# Altium schematic symbol library BT_Multi_Lib.SchLib: 4 symbols
Pins are listed as number, name and electrical type; pins without a type are passive.

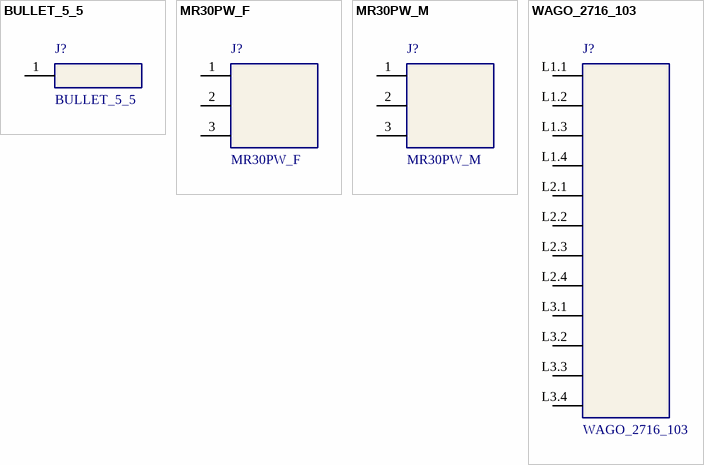
[diagram p0: symbols BULLET_5_5 to WAGO_2716_103]

## BULLET_5_5
designator J?
footprint _5.5
pins: 1

## MR30PW_F
designator J?
footprint MR30PW-F
pins: 1, 2, 3

## MR30PW_M
designator J?
footprint MR30PW-M
pins: 1, 2, 3

## WAGO_2716_103
designator J?
footprint P-2716-103
pins: L1.1, L1.2, L1.3, L1.4, L2.1, L2.2, L2.3, L2.4, L3.1, L3.2, L3.3, L3.4